# Altium footprint library FootPrintLib_0.PcbLib: 266 footprints (part 3 of 17)
Each footprint in its own frame and in the unit in brackets; x right, y up, seen from the top. Pads: shape width x height; smd on the part's side, far side on the other; paste and mask are expansions set on the pad; w line width, h text height; cw(c..) or ccw(c..) is an arc to the next point about the centre after c.
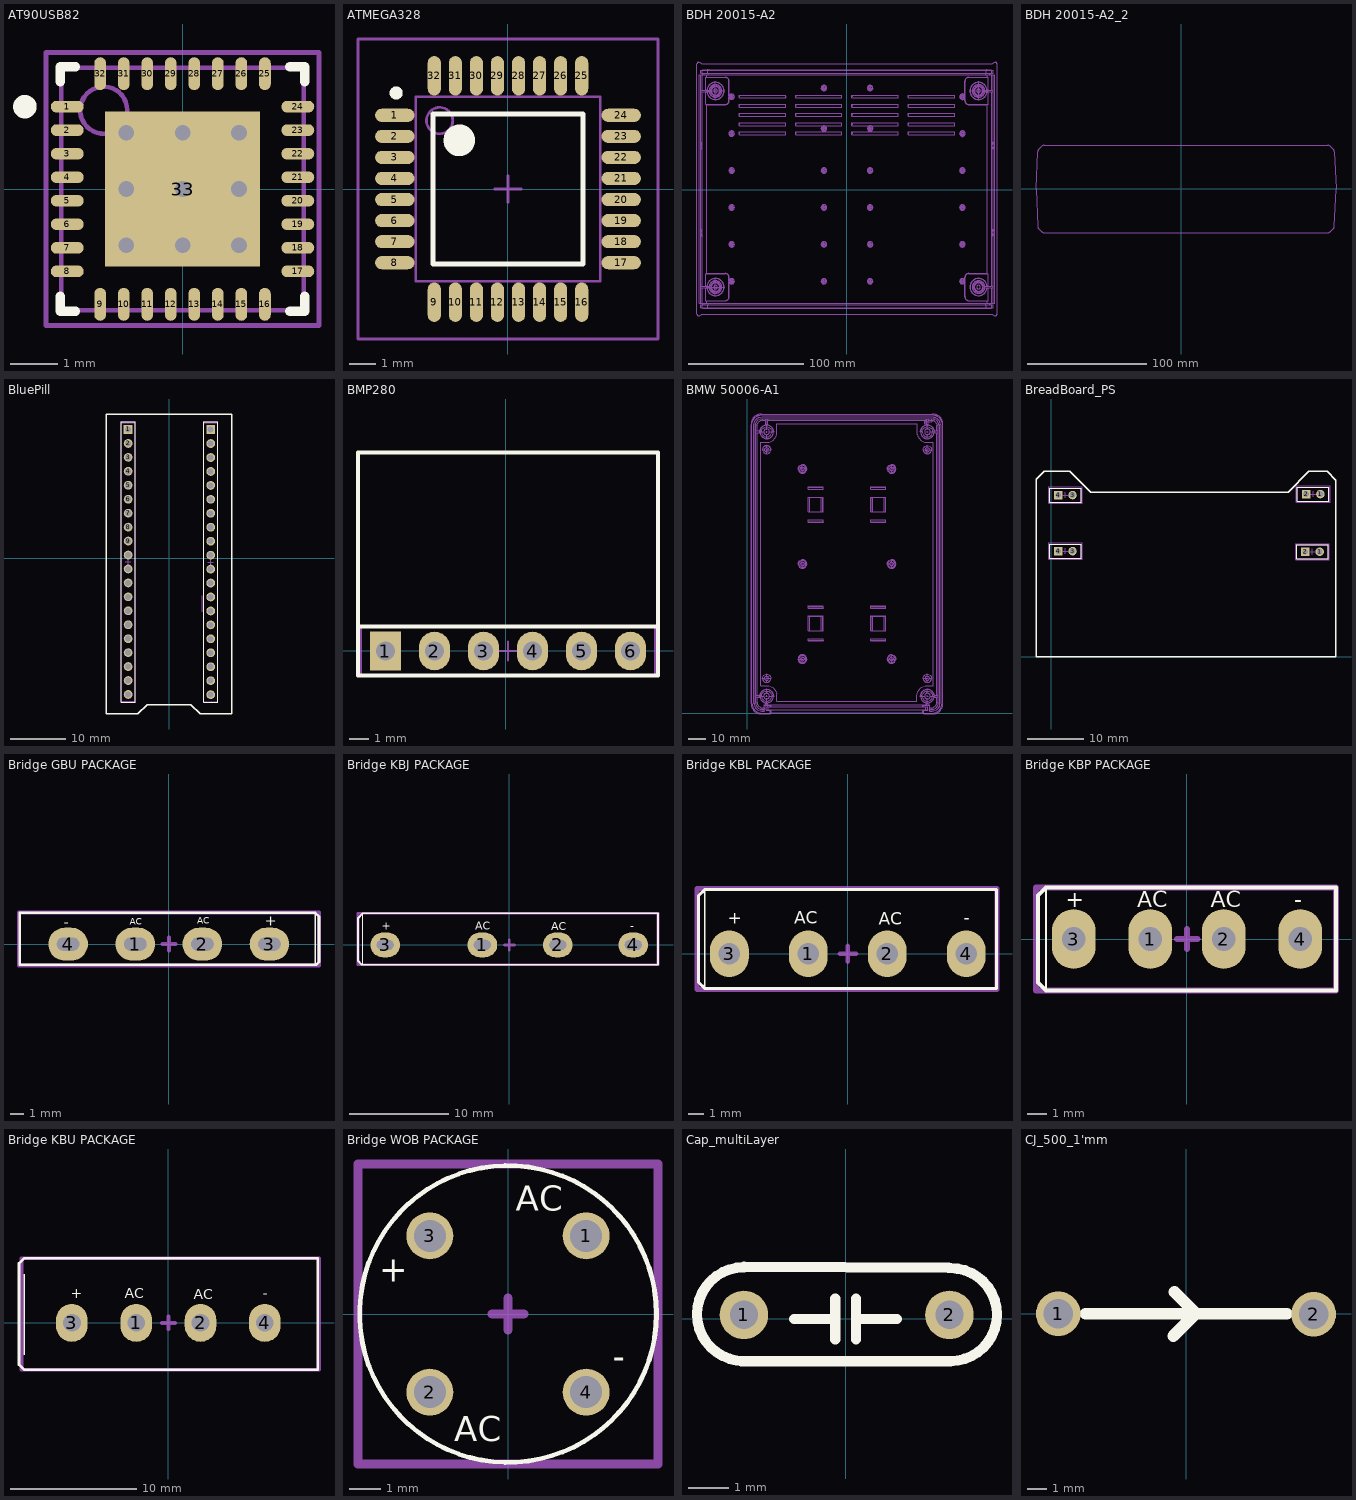
[diagram p2: the footprints below, top view; thin cyan lines are the x and y axes]

## AT90USB82 [mm]
pads (33):
  oval 0.7x0.25 smd: 1(-2.45,1.75) 2(-2.45,1.25) 3(-2.45,0.75) 4(-2.45,0.25) 5(-2.45,-0.25) 6(-2.45,-0.75) 7(-2.45,-1.25) 8(-2.45,-1.75) 17(2.45,-1.75) 18(2.45,-1.25) 19(2.45,-0.75) 20(2.45,-0.25) 21(2.45,0.25) 22(2.45,0.75) 23(2.45,1.25) 24(2.45,1.75)
  oval 0.25x0.7 smd: 9(-1.75,-2.45) 10(-1.25,-2.45) 11(-0.75,-2.45) 12(-0.25,-2.45) 13(0.25,-2.45) 14(0.75,-2.45) 15(1.25,-2.45) 16(1.75,-2.45) 25(1.75,2.45) 26(1.25,2.45) 27(0.75,2.45) 28(0.25,2.45) 29(-0.25,2.45) 30(-0.75,2.45) 31(-1.25,2.45) 32(-1.75,2.45)
  rect 3.3x3.3 smd: 33(0,0)
via -1.2,1.2 diameter 0.66 hole 0.33
via 0,1.2 diameter 0.66 hole 0.33
via 1.2,1.2 diameter 0.66 hole 0.33
via -1.2,0 diameter 0.66 hole 0.33
via 0,0 diameter 0.66 hole 0.33
via 1.2,0 diameter 0.66 hole 0.33
via -1.2,-1.2 diameter 0.66 hole 0.33
via 0,-1.2 diameter 0.66 hole 0.33
via 1.2,-1.2 diameter 0.66 hole 0.33
Top Overlay:
  circle w0.25: c-3.35,1.75 r0.125
  lines w0.2: -2.6,-2.275 -2.6,-2.6 -2.275,-2.6 ; -2.6,2.275 -2.6,2.6 -2.275,2.6 ; 2.275,-2.6 2.6,-2.6 2.6,-2.275 ; 2.275,2.6 2.6,2.6 2.6,2.275
Mechanical 13:
  circle w0.1: c-1.675,1.675 r0.5
  lines w0.1: -2.575,-2.575 -2.575,2.575 2.575,2.575 2.575,-2.575 -2.575,-2.575
Mechanical 15:
  lines w0.1: -0.5,0 0.5,0 ; 0,-0.5 0,0.5 ; -2.9,-2.9 -2.9,2.9 2.9,2.9 2.9,-2.9 -2.9,-2.9
3D body "QFN-32 V6.stp": height 1.05, standoff 0, extent -2.5,-2.5 2.5,2.5

## ATMEGA328 [mm] "Thin QFP, 32-Leads, Body 7x7mm, Pitch 0.8mm, IPC Low Density"
height 1.2
pads (32):
  oval 1.5x0.5 smd: 1(-4.301,2.8) 2(-4.301,2) 3(-4.301,1.2) 4(-4.301,0.4) 5(-4.301,-0.4) 6(-4.301,-1.2) 7(-4.301,-2) 8(-4.301,-2.8) 17(4.301,-2.8) 18(4.301,-2) 19(4.301,-1.2) 20(4.301,-0.4) 21(4.301,0.4) 22(4.301,1.2) 23(4.301,2) 24(4.301,2.8)
  oval 0.5x1.5 smd: 9(-2.8,-4.301) 10(-2,-4.301) 11(-1.2,-4.301) 12(-0.4,-4.301) 13(0.4,-4.301) 14(1.2,-4.301) 15(2,-4.301) 16(2.8,-4.301) 25(2.8,4.301) 26(2,4.301) 27(1.2,4.301) 28(0.4,4.301) 29(-0.4,4.301) 30(-1.2,4.301) 31(-2,4.301) 32(-2.8,4.301)
Top Overlay:
  circle w0.25: c-4.25,3.65 r0.125
  circle w0.6: c-1.85,1.85 r0.3
  lines w0.2: -2.85,-2.85 -2.85,2.85 2.85,2.85 2.85,-2.85 -2.85,-2.85
Mechanical 13:
  circle w0.1: c-2.6,2.6 r0.5
  lines w0.1: -3.5,-3.5 -3.5,3.5 3.5,3.5 3.5,-3.5 -3.5,-3.5
Mechanical 15:
  lines w0.1: -0.5,0 0.5,0 ; 0,-0.5 0,0.5 ; -5.7,-5.7 -5.7,5.7 5.7,5.7 5.7,-5.7 -5.7,-5.7
3D body "ATmega_AP214.STEP": height 1, standoff -0.1, extent -4.498,-4.498 4.498,4.498

## BDH 20015-A2 [mm]
Board Shape:
  drawing of 1798 lines, arcs and shapes, not listed

## BDH 20015-A2_2 [mm]
Board Shape:
  lines w0.2: -120.822,31.17 -122.179,0.098 -122.179,-0.207 -120.822,-31.279 -120.822,-31.306 ccw(c-117.756,-31.306) -119.924,-33.474 -119.747,-33.651 -117.31,-35.984 -117.238,-36.056 ccw(c-115.07,-33.888) -115.07,-36.954 -114.687,-36.954 cw(c-114.687,-36.963) -114.681,-36.957 ; -120.822,31.197 cw(c-117.756,31.197) -119.924,33.365 -119.747,33.542 -117.31,35.875 ; -117.238,35.948 cw(c-115.07,33.78) -115.07,36.846 -114.893,36.846 123.116,36.846 123.293,36.846 cw(c123.293,33.78) 125.461,35.948 125.533,35.875 127.971,33.542 128.147,33.365 cw(c125.979,31.197) 129.045,31.197 ; -114.893,-36.954 123.116,-36.954 123.293,-36.954 ccw(c123.293,-33.888) 125.461,-36.056 ; 125.533,-35.984 127.971,-33.651 128.147,-33.474 ccw(c125.979,-31.306) 129.045,-31.306 129.045,-31.279 130.402,-0.207 130.402,0.098 129.045,31.17

## BluePill [mm]
height 8.5
pads (40):
  rect 1.6x1.6 hole 1.1: 1(-7.468,23.47) 40(7.569,23.444)
  round 1.6 hole 1.1: 2(-7.468,20.93) 3(-7.468,18.39) 4(-7.468,15.85) 5(-7.468,13.31) 6(-7.468,10.77) 7(-7.468,8.23) 8(-7.468,5.69) 9(-7.468,3.15) 10(-7.468,0.61) 11(-7.468,-1.93) 12(-7.468,-4.47) 13(-7.468,-7.01) 14(-7.468,-9.55) 15(-7.468,-12.09) 16(-7.468,-14.63) 17(-7.468,-17.17) 18(-7.468,-19.71) 19(-7.468,-22.25) 20(-7.468,-24.79) 21(7.569,-24.816) 22(7.569,-22.276) 23(7.569,-19.736) 24(7.569,-17.196) 25(7.569,-14.656) 26(7.569,-12.116) 27(7.569,-9.576) 28(7.569,-7.036) 29(7.569,-4.496) 30(7.569,-1.956) 31(7.569,0.584) 32(7.569,3.124) 33(7.569,5.664) 34(7.569,8.204) 35(7.569,10.744) 36(7.569,13.284) 37(7.569,15.824) 38(7.569,18.364) 39(7.569,20.904)
Top Overlay:
  lines w0.2: -8.749,-26.213 -8.749,24.88 -8.74,24.89 -6.198,24.89 -6.198,-26.21 -8.738,-26.21 ; 6.287,-26.238 6.287,24.855 6.297,24.864 8.839,24.864 8.839,-26.236 6.299,-26.236
  lines w0.254: -11.455,-28.346 -5.74,-28.346 -4.013,-26.619 3.962,-26.619 5.69,-28.346 11.405,-28.346 11.405,26.289 -11.455,26.289 -11.455,26.134 -11.455,-28.346
Mechanical 11:
  lines w0.1: -8.738,-26.06 -6.198,-26.06 -6.198,24.74 -8.738,24.74 -8.738,-26.06 ; 6.299,-26.086 8.839,-26.086 8.839,24.714 6.299,24.714 6.299,-26.086
Mechanical 13:
  lines w0.1: -8.738,-26.21 -8.738,24.89 -6.198,24.89 -6.198,-26.21 -8.738,-26.21 ; 6.299,-26.236 6.299,24.864 8.839,24.864 8.839,-26.236 6.299,-26.236
Mechanical 15:
  lines w0.1: -7.968,-0.66 -6.968,-0.66 ; -7.468,-1.16 -7.468,-0.16 ; 6.059,-9.68 6.059,-6.83 ; 7.069,-0.686 8.069,-0.686 ; 7.569,-1.186 7.569,-0.186
3D body "STM32F103C8T6_Blue_Pill v6.step": height 9.77, standoff -8.5, extent -11.278,-28.22 11.582,29.34

## BMP280 [mm]
pads (6):
  rect 1.6x2 hole 1: 1(-6.223,-0.025)
  oval 1.6x2 hole 1: 2(-3.683,-0.025) 3(-1.143,-0.025) 4(1.397,-0.025) 5(3.937,-0.025) 6(6.477,-0.025)
Top Overlay:
  lines w0.2: -7.645,1.27 -7.645,10.262 7.899,10.262 7.899,1.245 ; -7.643,-1.295 7.897,-1.295 7.897,1.245 -7.643,1.245 -7.643,-1.295
Mechanical 11:
  lines w0.1: -7.493,-1.295 -7.493,1.245 7.747,1.245 7.747,-1.295 -7.493,-1.295
Mechanical 13:
  lines w0.1: -7.643,-1.295 7.897,-1.295 7.897,1.245 -7.643,1.245 -7.643,-1.295
Mechanical 15:
  lines w0.1: -0.373,-0.025 0.627,-0.025 ; 0.127,-0.525 0.127,0.475
3D body "User Library-Module_bme280.STEP": height 6.6, standoff -4.6, extent -7.543,-1.219 7.797,10.281

## BMW 50006-A1 [mm]
Board Shape:
  drawing of 1663 lines, arcs and shapes, not listed

## BreadBoard_PS [mm]
pads (8):
  round 1.5 hole 1.02: 1(47.523,18.644) 1(47.65,28.854) 3(3.734,18.745) 3(3.734,28.677)
  rect 1.5x1.5 hole 1.02: 2(44.983,18.644) 2(45.11,28.854) 4(1.194,18.745) 4(1.194,28.677)
Top Overlay:
  lines w0.2: -0.326,17.495 -0.326,19.995 5.254,19.995 5.254,17.495 -0.326,17.495 ; -0.326,27.427 5.254,27.427 5.254,29.927 -0.326,29.927 -0.326,27.427 ; 43.463,17.394 49.043,17.394 49.043,19.894 43.463,19.894 43.463,17.394 ; 43.59,27.604 49.17,27.604 49.17,30.104 43.59,30.104 43.59,27.604
  lines w0.254: -2.743,0.025 50.419,0.025 50.419,31.318 50.413,31.318 48.863,32.868 46.819,32.868 45.618,32.868 41.935,29.185 18.415,29.185 6.96,29.185 3.226,32.918 0.73,32.918 -1.314,32.918 -2.743,31.49 -2.743,0.025
Mechanical 11:
  lines w0.1: -0.326,17.495 -0.326,19.995 5.254,19.995 5.254,17.495 -0.326,17.495 ; -0.326,27.427 5.254,27.427 5.254,29.927 -0.326,29.927 -0.326,27.427 ; 43.463,17.394 49.043,17.394 49.043,19.894 43.463,19.894 43.463,17.394 ; 43.59,27.604 49.17,27.604 49.17,30.104 43.59,30.104 43.59,27.604
Mechanical 13:
  lines w0.1: -0.451,17.495 -0.451,19.995 5.379,19.995 5.379,17.495 -0.451,17.495 ; -0.451,27.427 5.379,27.427 5.379,29.927 -0.451,29.927 -0.451,27.427 ; 43.338,17.394 49.168,17.394 49.168,19.894 43.338,19.894 43.338,17.394 ; 43.465,27.604 43.465,30.104 49.295,30.104 49.295,27.604 43.465,27.604
Mechanical 15:
  lines w0.1: 1.964,18.745 2.964,18.745 ; 1.964,28.677 2.964,28.677 ; 2.464,18.245 2.464,19.245 ; 2.464,28.177 2.464,29.177 ; 45.753,18.644 46.753,18.644 ; 45.88,28.854 46.88,28.854 ; 46.253,18.144 46.253,19.144 ; 46.38,28.354 46.38,29.354 ; -0.526,17.295 -0.526,20.195 5.454,20.195 5.454,17.295 -0.526,17.295 ; -0.526,27.227 5.454,27.227 5.454,30.127 -0.526,30.127 -0.526,27.227 ; 43.263,17.194 49.243,17.194 49.243,20.094 43.263,20.094 43.263,17.194 ; 43.39,27.404 43.39,30.304 49.37,30.304 49.37,27.404 43.39,27.404
3D body "61300211821.stp": height 8.55, standoff -3.06, extent -0.301,27.508 5.279,30.008
3D body "61300211821.stp": height 8.55, standoff -3.06, extent -0.275,17.394 5.305,19.894
3D body "61300211821.stp": height 8.55, standoff -3.06, extent 43.565,17.566 49.145,20.066
3D body "61300211821.stp": height 8.55, standoff -3.06, extent 43.518,27.681 49.098,30.181
3D body "Breadboard_Power_Supply_5V_3.3V.step": height 23.79, standoff -0.1, extent -2.75,-0.073 50.35,32.969

## Bridge GBU PACKAGE [mm] "GBU Bridge Rectifiers DESIGNER :ABBAS BASEREH"
height 30
pads (4):
  oval 3x2.5 hole 1 slot 1.7 at 0 deg: 1(-2.54,0) 2(2.54,0) 3(7.62,0) 4(-7.63,0)
Top Overlay:
  lines w0.1: 11.075,-1.575 11.075,2.375
  lines w0.2: -11.3,-1.575 -11.3,2.375 11.075,2.375 11.375,2.075 11.375,-1.35 11.15,-1.575 -11.3,-1.575
  text "AC" at -2.95,1.475 h0.5
  text "+" at 7.275,1.375 h0.8
  text "-" at -7.975,1.275 h0.8
  text "AC" at 2.15,1.525 h0.5
Mechanical 15:
  lines w0.3: -0.5,0 0.525,0 ; 0,-0.5 0,0.5 ; -11.35,-1.625 11.375,-1.625 11.375,2.4 -11.35,2.4 -11.35,-1.625
3D body "User Library-GBU.STEP": height 21.83, standoff -2.5, extent -11.125,-1.41 11.175,2.15

## Bridge KBJ PACKAGE [mm] "KBJ Bridge Rectifiers DESIGNER :ABBAS BASEREH"
height 35
pads (4):
  oval 3x2.5 hole 1 slot 1.7 at 0 deg: 1(-2.715,0) 2(4.905,0) 3(-12.525,0) 4(12.525,0)
Top Overlay:
  lines w0.1: -14.775,-2 -14.775,3.1
  lines w0.2: -15.275,-1.6 -14.875,-2 15.025,-2 15.025,3.2 -14.775,3.2 -15.275,2.7 -15.275,-1.6
  text "+" at -12.875,1.525 h0.8
  text "-" at 12.225,1.525 h0.8
  text "AC" at 4.225,1.5 h0.8
  text "AC" at -3.408,1.525 h0.8
Mechanical 15:
  lines w0.3: -0.5,0 0.525,0 ; 0,-0.5 0,0.5 ; -15.275,-2 15.025,-2 15.025,3.2 -15.275,3.2 -15.275,-2
3D body "User Library-KBJ-GSIB.STEP": height 31.25, standoff -7.71, extent -15.071,-1.8 14.925,3

## Bridge KBL PACKAGE [mm] "KBL Bridge Rectifiers DESIGNER :ABBAS BASEREH"
height 15
pads (4):
  oval 2.5x3 hole 1.4: 1(-2.54,0) 2(2.54,0) 3(-7.62,0) 4(7.62,0)
Top Overlay:
  lines w0.1: -9.2,-2.225 -9.2,4.125
  lines w0.2: -9.612,-1.813 -9.2,-2.225 9.563,-2.225 9.563,4.125 -9.2,4.125 -9.612,3.713 -9.612,-1.813
  text "+" at -7.725,1.925 h0.8
  text "-" at 7.475,1.925 h0.8
  text "AC" at 2,1.875 h0.8
  text "AC" at -3.45,1.925 h0.8
Mechanical 15:
  lines w0.3: -0.5,0 0.525,0 ; 0,-0.5 0,0.5 ; -9.7,-2.3 9.6,-2.3 9.6,4.2 -9.7,4.2 -9.7,-2.3
3D body "User Library-KBL-1.STEP": height 16.05, standoff -4.2, extent -9.512,-2.125 9.488,4.126

## Bridge KBP PACKAGE [mm] "KBP Bridge Rectifiers DESIGNER :ABBAS BASEREH"
height 10
pads (4):
  oval 2.2x3 hole 1.2: 1(-1.85,0) 2(1.85,0) 3(-5.7,0) 4(5.7,0)
Top Overlay:
  lines w0.1: -7.1,-2.55 -7.1,2.6
  lines w0.2: -7.5,-2.2 -7.1,-2.6 7.5,-2.6 7.5,2.6 -7.1,2.6 -7.5,2.2 -7.5,-2.2
  text "+" at -6.1,1.6 h0.8
  text "-" at 5.4,1.6 h0.8
  text "AC" at 1.2,1.6 h0.8
  text "AC" at -2.5,1.6 h0.8
Mechanical 15:
  lines w0.3: -0.5,0 0.525,0 ; 0,-0.5 0,0.5 ; -7.6,-2.6 7.5,-2.6 7.5,2.6 -7.6,2.6 -7.6,-2.6
3D body "User Library-KBP.STEP": height 12.49, standoff -3.2, extent -7.377,-2.415 7.353,2.41

## Bridge KBU PACKAGE [mm] "KBU Bridge Rectifiers DESIGNER :ABBAS BASEREH"
height 18
pads (4):
  oval 2.5x3 hole 1.4: 1(-2.54,0) 2(2.54,0) 3(-7.62,0) 4(7.62,0)
Top Overlay:
  lines w0.1: -11.4,-2.5 -11.4,3.85
  lines w0.2: -11.8,-3.3 -11.8,4.7 -11.4,5.1 11.8,5.1 11.8,-3.7 -11.4,-3.7 -11.8,-3.3
  text "AC" at -3.45,1.925 h0.8
  text "AC" at 2,1.875 h0.8
  text "-" at 7.475,1.925 h0.8
  text "+" at -7.725,1.925 h0.8
Mechanical 15:
  lines w0.3: -0.5,0 0.525,0 ; 0,-0.5 0,0.5 ; -11.6,-3.7 -11.6,5.1 11.9,5.1 11.9,-3.7 -11.6,-3.7
3D body "User Library-KBU.STEP": height 19.6, standoff -4.2, extent -11.612,-3.55 11.588,4.95

## Bridge WOB PACKAGE [mm] "WOB Bridge Rectifiers DESIGNER :ABBAS BASEREH"
height 5.1
pads (4):
  round 1.5 / inner round 1.905 / far side round 1.905 hole 1.016: 1(2.5,2.5) 2(-2.5,-2.5) 3(-2.5,2.5) 4(2.5,-2.5)
Top Overlay:
  circle w0.15: c0,0 r4.75
  text "AC" at 0.25,3.3 h0.8
  text "AC" at -1.725,-4.075 h0.8
  text "+" at -4.125,1.025 h0.8
  text "-" at 3.35,-1.75 h0.8
Mechanical 15:
  lines w0.3: -0.5,0 0.5,0 ; 0,-0.5 0,0.5 ; -4.8,-4.8 4.8,-4.8 4.8,4.8 -4.8,4.8 -4.8,-4.8
3D body "User Library-WOB.STEP": height 5.9, standoff -3.2, extent -4.675,-4.675 4.625,4.625

## Cap_multiLayer [mm]
pads (2):
  round 1.2 hole 0.7: 1(-2.515,0.102) 2(2.565,0.102)
Top Overlay:
  lines w0.254: -2.565,-1.041 2.54,-1.041 ; -2.515,-1.04 cw(c-2.515,0.12) -2.515,1.28 ; -2.514,1.288 2.54,1.264 ; -1.27,0 -0.254,0 ; -0.254,-0.508 -0.254,0.508 ; 0.254,-0.508 0.254,0.508 ; 0.254,0 1.27,0 ; 2.591,-1.041 ccw(c2.591,0.109) 2.591,1.259
3D body "Multilayer Capacitor - 5mm grid.step": height 6.5, standoff -2.4, extent -2.819,-0.898 2.871,1.102

## CJ_500_1'mm [mil] "12.7 mm (500 mil) Jumper wire"
pads (2):
  round 90 hole 60: 1(-258,0) 2(257,-1)
Top Overlay:
  lines w24: -203,0 203,0
  lines w24.02: -26.12,-44.88 15.63,-3.12 ; -24,44 17.76,2.24
3D body: height 795.28, standoff 7.87, extent 223.71,-37.78 294.3,32.94
3D body: height 795.28, standoff 7.87, extent -292.29,-33.78 -221.7,36.94
3D body: height 33.46, standoff 5.91, extent -263.64,-13.72 -236.22,13.72
3D body: height 33.46, standoff 5.91, extent 236.36,-13.72 263.78,13.72
3D body: height 795.21, standoff 724.48, extent -250,-35.15 250,35.44